# Altium footprint library SYNCBOX_TST.PcbLib: 267 footprints (part 3 of 17)
Each footprint in its own frame and in the unit in brackets; x right, y up, seen from the top. Pads: shape width x height; smd on the part's side, far side on the other; paste and mask are expansions set on the pad; w line width, h text height; cw(c..) or ccw(c..) is an arc to the next point about the centre after c.
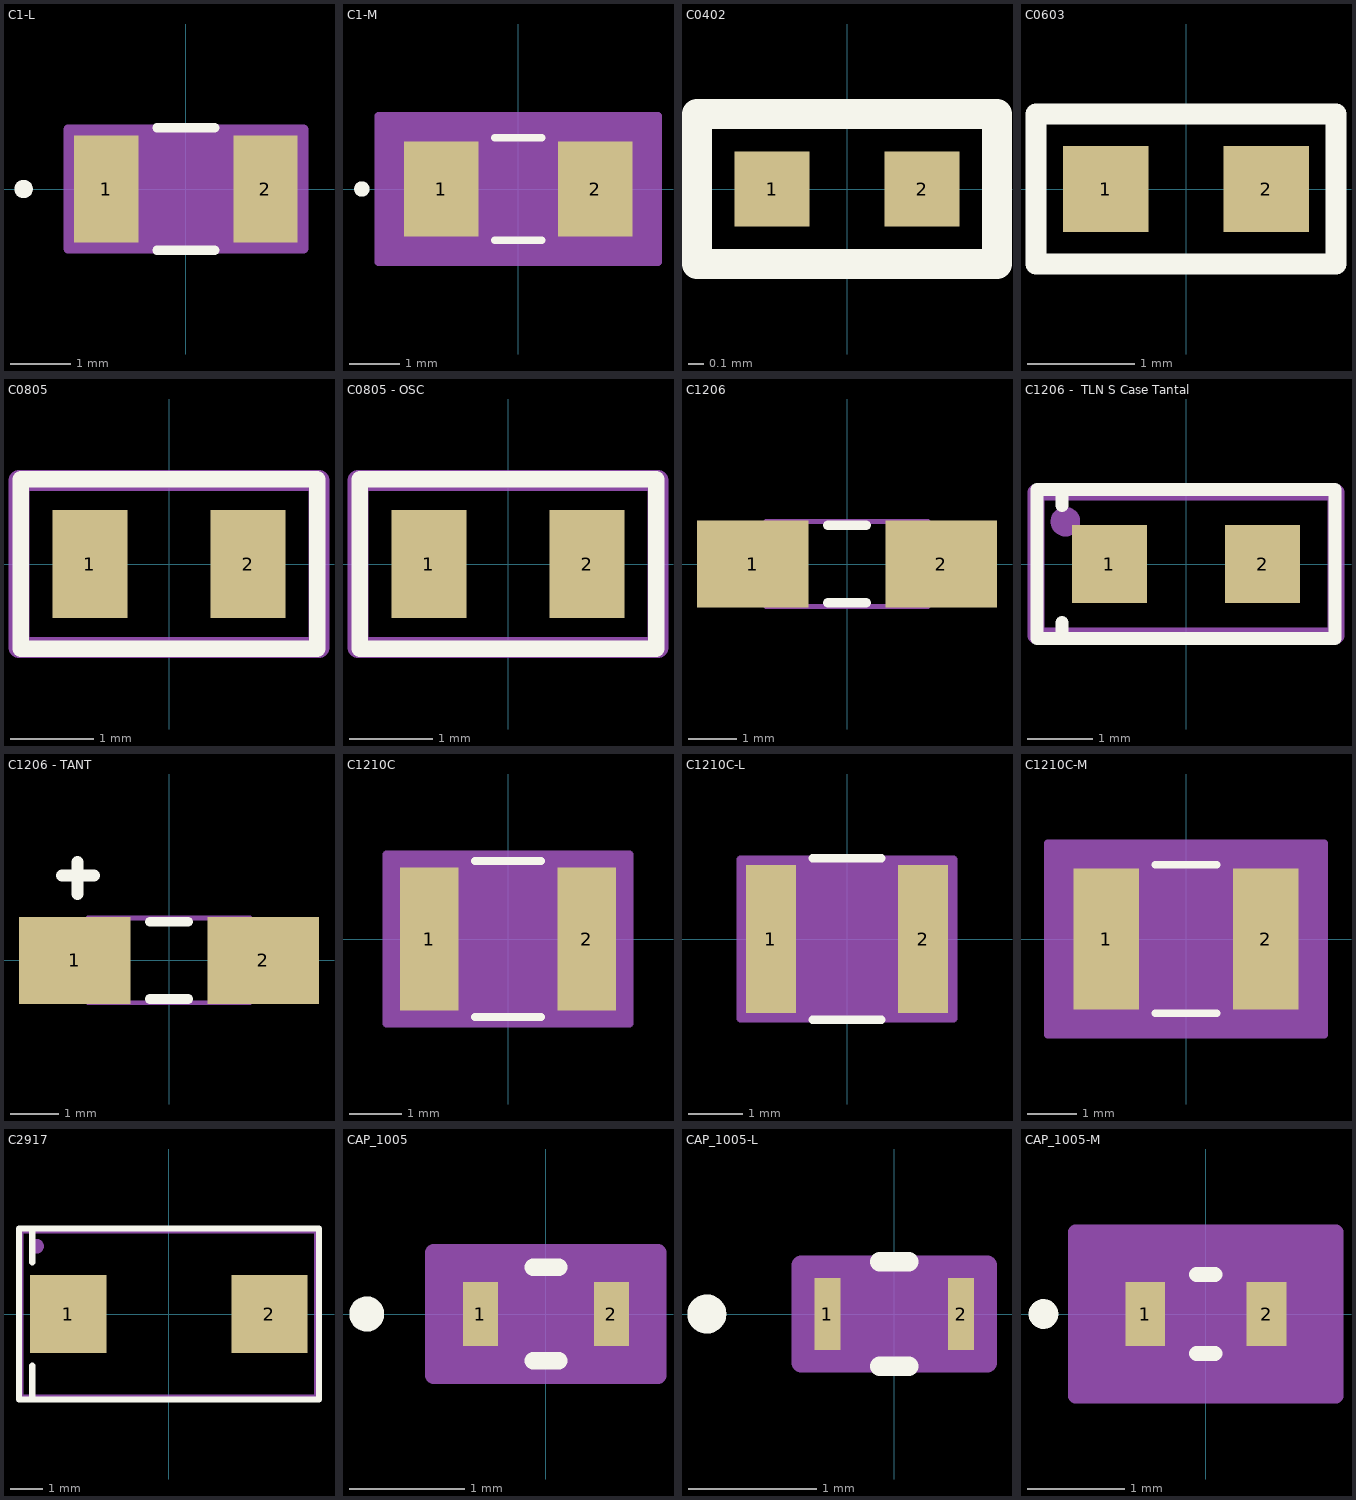
[diagram p2: the footprints below, top view; thin cyan lines are the x and y axes]

## C1-L [mil]
pads (2):
  rect 42x70 smd paste+0 mask+0: 1(-52,0) 2(52,0)
Top Overlay:
  circle w6: c-106,0 r3
  lines w6: -18.89,-40 18.89,-40 ; -18.89,40 18.89,40
Mechanical 13:
  circle w0: c-57,0 r3
  lines w1: -67,-35 -67,35 ; -67,-35 -31,-35 -31,35 -67,35 ; -67,-35 67,-35 ; -67,-35 -67,35 ; -67,35 67,35 ; 67,-35 31,-35 31,35 67,35 ; 67,-35 67,35 ; 67,-35 67,35
Mechanical 15:
  region: 77,-39 -77,-39 -77,39 77,39
  lines w6: -77,-39 -77,39 77,39 77,-39 -77,-39
3D body "C1-L.stp": height 30.98, standoff 0, extent -67,-35 67.01,35
3D body: height 10, standoff 0, extent 0,0 10,10

## C1-M [mil]
pads (2):
  rect 58x74 smd paste+0 mask+0: 1(-60,0) 2(60,0)
Top Overlay:
  circle w6: c-122,0 r3
  lines w6: -18.25,-40 18.25,-40 ; -18.25,40 18.25,40
Mechanical 13:
  circle w0: c-57,0 r3
  lines w1: -67,-35 -67,35 ; -67,-35 67,-35 ; -67,-35 -31,-35 -31,35 -67,35 ; -67,-35 -67,35 ; -67,35 67,35 ; 67,-35 67,35 ; 67,-35 67,35 ; 67,-35 31,-35 31,35 67,35
Mechanical 15:
  region: 109,-57 -109,-57 -109,57 109,57
  lines w6: -109,-57 109,-57 109,57 -109,57 -109,-57
3D body "C1-M.stp": height 30.98, standoff 0, extent -67,-35 67.01,35
3D body: height 10, standoff 0, extent 0,0 10,10

## C0402 [mm]
pads (2):
  rect 0.5x0.5 smd: 1(-0.5,0) 2(0.5,0)
Top Overlay:
  lines w0.2: -1,-0.5 -1,0.5 1,0.5 1,-0.5 -1,-0.5
Mechanical 16:
  lines w0.15: -1,-0.5 -1,0.5 1,0.5 1,-0.5 -1,-0.5
Mechanical 29:
  text ".Designator" at 0.7,0.2 h0.4
3D body "CAPC1005X56N EIA 0402.step": height 0.56, standoff 0, extent -0.5,-0.25 0.5,0.25

## C0603 [mm]
pads (2):
  rect 0.8x0.8 smd: 1(-0.75,0) 2(0.75,0)
Top Overlay:
  lines w0.2: -1.4,-0.7 -1.4,0.7 1.4,0.7 1.4,-0.7 -1.4,-0.7
Mechanical 16:
  lines w0.15: -1.4,-0.7 1.4,-0.7 1.4,0.7 -1.4,0.7 -1.4,-0.7
Mechanical 29:
  text ".Designator" at -1.1,-0.3 h0.6
3D body "C0603.step": height 0.79, standoff 0, extent -0.8,-0.425 0.8,0.435
3D body "C0603.step": height 0.95, standoff 0.15, extent -0.8,-0.425 0.8,0.435

## C0805 [mm]
pads (2):
  rect 0.9x1.3 smd: 1(-0.95,0) 2(0.95,0)
Top Overlay:
  lines w0.2: -1.778,-1.016 1.778,-1.016 1.778,1.016 -1.778,1.016 -1.778,-1.016
Mechanical 16:
  lines w0.254: -1.8,-1 1.8,-1 1.8,1 -1.8,1 -1.8,-1
Mechanical 29:
  text ".Designator" at 0.7,0.3 h0.6
3D body "CAPC2012X95N EIA 0805.step": height 0.95, standoff 0, extent -1,-0.6 1,0.6
3D body "CAPC2012X95N EIA 0805.step": height 1.5, standoff 0.55, extent -1,-0.6 1,0.6

## C0805 - OSC [mm]
pads (2):
  rect 0.9x1.3 smd: 1(-0.95,0) 2(0.95,0)
Top Overlay:
  lines w0.2: -1.778,-1.016 1.778,-1.016 1.778,1.016 -1.778,1.016 -1.778,-1.016
Mechanical 16:
  lines w0.254: -1.8,-1 1.8,-1 1.8,1 -1.8,1 -1.8,-1
Mechanical 29:
  text ".Designator" at 0.7,0.3 h0.6
3D body "ABS06.STEP": height 0.61, standoff 0, extent -1.003,-0.597 1.003,0.597

## C1206 [mm]
height 1.8
pads (2):
  rect 2.3x1.8 smd: 1(-1.95,0) 2(1.95,0)
Top Overlay:
  lines w0.2: -0.4,-0.8 0.4,-0.8 ; -0.4,0.8 0.4,0.8
Mechanical 13:
  lines w0.1: -1.675,-0.875 -1.675,0.875 1.675,0.875 1.675,-0.875 -1.675,-0.875
3D body "C1206X102KGRACAUTO.step": height 1.85, standoff 0, extent -1.698,-0.889 2.002,1.061

## C1206 -  TLN S Case Tantal [mm]
pads (2):
  rect 1.15x1.2 smd: 1(-1.175,0) 2(1.175,0)
Top Overlay:
  lines w0.2: -1.9,-1.143 -1.9,-0.9 ; -1.9,0.9 -1.9,1.143 ; -2.286,-1.143 2.286,-1.143 2.286,1.143 -2.286,1.143 -2.286,-1.143
Mechanical 16:
  circle w0.254: c-1.85,0.65 r0.1
  lines w0.254: -2.3,-1.1 2.3,-1.1 2.3,1.1 -2.3,1.1 -2.3,-1.1
Mechanical 29:
  text ".Designator" at 1.8,0.5 h1
3D body: height 1.2, standoff 0, extent -1.6,-0.8 1.6,0.8
3D body: height 1.21, standoff 1.2, extent -1.6,-0.8 -0.9,0.8

## C1206 - TANT [mm]
height 1.8
pads (2):
  rect 2.3x1.8 smd: 1(-1.95,0) 2(1.95,0)
Top Overlay:
  lines w0.2: -0.4,-0.8 0.4,-0.8 ; -0.4,0.8 0.4,0.8
  lines w0.254: -2.21,1.753 -1.549,1.753 ; -1.892,1.372 -1.892,2.032
Mechanical 13:
  lines w0.1: -1.675,-0.875 1.675,-0.875 1.675,0.875 -1.675,0.875 -1.675,-0.875
3D body "293D A-CASE.stp": height 1.77, standoff -0.06, extent -1.829,-0.907 1.575,0.991

## C1210C [mil]
pads (2):
  rect 44x107 smd paste+0 mask+0: 1(-59,0) 2(59,0)
Top Overlay:
  lines w6: -24.89,-58.5 24.89,-58.5 ; -24.89,58.5 24.89,58.5
Mechanical 13:
  lines w1: -67,-53.5 -67,53.5 ; -67,-53.5 -37,-53.5 -37,53.5 -67,53.5 ; -67,-53.5 67,-53.5 ; -67,-53.5 -67,53.5 ; -67,53.5 67,53.5 ; 67,-53.5 37,-53.5 37,53.5 67,53.5 ; 67,-53.5 67,53.5 ; 67,-53.5 67,53.5
Mechanical 15:
  region: 91,-63.5 -91,-63.5 -91,63.5 91,63.5
  lines w6: -91,-63.5 -91,63.5 91,63.5 91,-63.5 -91,-63.5
3D body "C1210C.stp": height 90.98, standoff 0, extent -67.01,-53.5 67.01,53.5
3D body: height 10, standoff 0, extent 0,0 10,10

## C1210C-L [mil]
pads (2):
  rect 36x107 smd paste+0 mask+0: 1(-55,0) 2(55,0)
Top Overlay:
  lines w6: -24.89,-58.5 24.89,-58.5 ; -24.89,58.5 24.89,58.5
Mechanical 13:
  lines w1: -67,-53.5 -67,53.5 ; -67,-53.5 -37,-53.5 -37,53.5 -67,53.5 ; -67,-53.5 67,-53.5 ; -67,-53.5 -67,53.5 ; -67,53.5 67,53.5 ; 67,-53.5 37,-53.5 37,53.5 67,53.5 ; 67,-53.5 67,53.5 ; 67,-53.5 67,53.5
Mechanical 15:
  region: 77,-57.5 -77,-57.5 -77,57.5 77,57.5
  lines w6: -77,-57.5 -77,57.5 77,57.5 77,-57.5 -77,-57.5
3D body "C1210C-L.stp": height 90.98, standoff 0, extent -67,-53.5 67.01,53.51
3D body: height 10, standoff 0, extent 0,0 10,10

## C1210C-M [mil]
pads (2):
  rect 52x111 smd paste+0 mask+0: 1(-63,0) 2(63,0)
Top Overlay:
  lines w6: -24.25,-58.5 24.25,-58.5 ; -24.25,58.5 24.25,58.5
Mechanical 13:
  lines w1: -67,-53.5 -67,53.5 ; -67,-53.5 67,-53.5 ; -67,-53.5 -37,-53.5 -37,53.5 -67,53.5 ; -67,-53.5 -67,53.5 ; -67,53.5 67,53.5 ; 67,-53.5 67,53.5 ; 67,-53.5 67,53.5 ; 67,-53.5 37,-53.5 37,53.5 67,53.5
Mechanical 15:
  region: 109,-75.5 -109,-75.5 -109,75.5 109,75.5
  lines w6: -109,-75.5 109,-75.5 109,75.5 -109,75.5 -109,-75.5
3D body "C1210C-M.stp": height 90.98, standoff 0, extent -67,-53.5 67.01,53.51
3D body: height 10, standoff 0, extent 0,0 10,10

## C2917 [mm]
pads (2):
  rect 2.37x2.43 smd: 1(-3.12,0) 2(3.12,0)
Top Overlay:
  lines w0.2: -4.24,-2.65 -4.24,-1.6 ; -4.24,1.6 -4.24,2.65 ; -4.645,-2.65 -4.645,2.65 4.655,2.65 4.655,-2.65 -4.645,-2.65
Mechanical 16:
  circle w0.254: c-4.1,2.1 r0.1
  lines w0.2: -4.6,-2.6 4.6,-2.6 4.6,2.6 -4.6,2.6 -4.6,-2.6
Mechanical 29:
  text ".Designator" at -2.1,-0.9 h1.52
3D body "CAP_TANT_7343-31.step": height 3.1, standoff 0, extent -3.795,-2.3 3.805,2.3

## CAP_1005 [mil]
pads (2):
  rect 12x22 smd paste+0 mask+0: 1(-22.5,0) 2(22.5,0)
Top Overlay:
  circle w6: c-61.5,0 r3
  lines w6: -4.39,-16 4.39,-16 ; -4.39,16 4.39,16
Mechanical 13:
  circle w0: c-17.5,0 r3
  lines w1: -20.5,-11 -20.5,11 ; -20.5,-11 -16.5,-11 -16.5,11 -20.5,11 ; -20.5,-11 20.5,-11 ; -20.5,-11 -20.5,11 ; -20.5,11 20.5,11 ; 20.5,-11 16.5,-11 16.5,11 20.5,11 ; 20.5,-11 20.5,11 ; 20.5,-11 20.5,11
Mechanical 15:
  region: 38.5,-21 -38.5,-21 -38.5,21 38.5,21
  lines w6: -38.5,-21 -38.5,21 38.5,21 38.5,-21 -38.5,-21
3D body: height 10, standoff 0, extent 0,0 10,10
3D body "CAP_1005.stp": height 22.01, standoff 0, extent -20.51,-10.98 20.51,10.98

## CAP_1005-L [mil]
pads (2):
  rect 8x22 smd paste+0 mask+0: 1(-20.5,0) 2(20.5,0)
Top Overlay:
  circle w6: c-57.5,0 r3
  lines w6: -4.39,-16 4.39,-16 ; -4.39,16 4.39,16
Mechanical 13:
  circle w0: c-15.5,0 r3
  lines w1: -20.5,-11 -20.5,11 ; -20.5,-11 -16.5,-11 -16.5,11 -20.5,11 ; -20.5,-11 20.5,-11 ; -20.5,-11 -20.5,11 ; -20.5,11 20.5,11 ; 20.5,-11 16.5,-11 16.5,11 20.5,11 ; 20.5,-11 20.5,11 ; 20.5,-11 20.5,11
Mechanical 15:
  region: 28.5,-15 -28.5,-15 -28.5,15 28.5,15
  lines w6: -28.5,-15 -28.5,15 28.5,15 28.5,-15 -28.5,-15
3D body "CAP_1005-L.stp": height 22.01, standoff 0, extent -20.51,-10.98 20.52,10.99
3D body: height 10, standoff 0, extent 0,0 10,10

## CAP_1005-M [mil]
pads (2):
  rect 16x26 smd paste+0 mask+0: 1(-24.5,0) 2(24.5,0)
Top Overlay:
  circle w6: c-65.5,0 r3
  lines w6: -3.75,-16 3.75,-16 ; -3.75,16 3.75,16
Mechanical 13:
  circle w0: c-19.5,0 r3
  lines w1: -20.5,-11 -20.5,11 ; -20.5,-11 -16.5,-11 -16.5,11 -20.5,11 ; -20.5,-11 20.5,-11 ; -20.5,-11 -20.5,11 ; -20.5,11 20.5,11 ; 20.5,-11 16.5,-11 16.5,11 20.5,11 ; 20.5,-11 20.5,11 ; 20.5,-11 20.5,11
Mechanical 15:
  region: 52.5,-33 -52.5,-33 -52.5,33 52.5,33
  lines w6: -52.5,-33 -52.5,33 52.5,33 52.5,-33 -52.5,-33
3D body "CAP_1005-M.stp": height 22.01, standoff 0, extent -20.51,-10.98 20.52,10.99
3D body: height 10, standoff 0, extent 0,0 10,10